# Altium schematic symbol library LCD.SchLib: 1 symbol
Pins are listed as number, name and electrical type; pins without a type are passive.

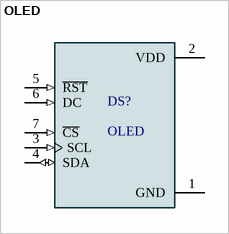
[diagram p0: symbol OLED]

## OLED
designator DS?
Non-Touch Graphic LCD Display Module - Blue OLED SPI 1.3 (33.02mm) 128 x 64; MF: Orient Display; MP: AOM12864A0-1.3BW-ANO; SnapEDA_Link: https://www.snapeda.com/parts/AOM12864A0-1.3BW-ANO/Orient+Display/view-part/?ref=snap; Package: None; Value: *; Check_prices: https://www.snapeda.com/parts/AOM12864A0-1.3BW-ANO/Orient+Display/view-part/?ref=eda
footprint OLD_SPI_1.3 (LCD_AOM12864A0-1.3BW-ANO)
pins: 1 GND (power), 2 VDD (power), 3 SCL (in), 4 SDA (io), 5 ~{RST} (in), 6 DC (in), 7 ~{CS} (in)